# Altium footprint library SnapEDApcb.PcbLib: 1 footprints
Each footprint in its own frame and in the unit in brackets; x right, y up, seen from the top. Pads: shape width x height; smd on the part's side, far side on the other; paste and mask are expansions set on the pad; w line width, h text height; cw(c..) or ccw(c..) is an arc to the next point about the centre after c.
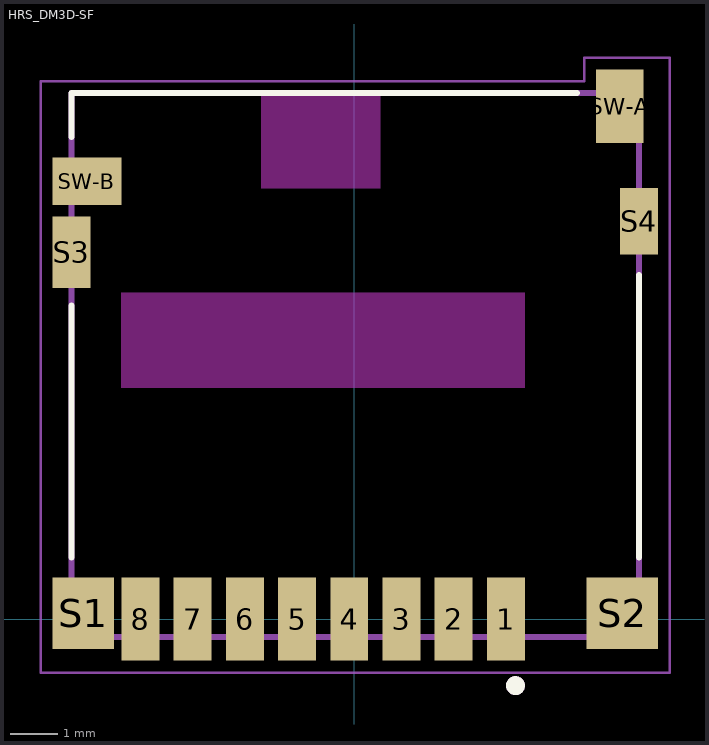
[diagram p0: the footprint, top view; thin cyan lines are the x and y axes]

## HRS_DM3D-SF [mm]
pads (14):
  rect 0.8x1.75 smd: 1(3.2,0) 2(2.1,0) 3(1,0) 4(-0.1,0) 5(-1.2,0) 6(-2.3,0) 7(-3.4,0) 8(-4.5,0)
  rect 1.3x1.5 smd: S1(-5.7,0.125)
  rect 1.5x1.5 smd: S2(5.65,0.125)
  rect 0.8x1.5 smd: S3(-5.95,7.725)
  rect 0.8x1.4 smd: S4(6,8.375)
  rect 1x1.55 smd: SW-A(5.6,10.8)
  rect 1.45x1 smd: SW-B(-5.625,9.225)
Top Overlay:
  circle w0.2: c3.4,-1.4 r0.1
  lines w0.127: -5.95,1.3 -5.95,6.6 ; -5.95,10.15 -5.95,11.075 4.7,11.075 ; 6,1.3 6,7.25
Keep-Out Layer:
  region: 0.55,9.075 -1.95,9.075 -1.95,11.075 0.55,11.075
  region: 3.6,4.875 -4.9,4.875 -4.9,6.875 3.6,6.875
  region: 3.6,4.875 -4.9,4.875 -4.9,6.875 3.6,6.875
  region: 0.55,9.075 -1.95,9.075 -1.95,11.075 0.55,11.075
Mechanical 13:
  circle w0.2: c3.4,-1.4 r0.1
  lines w0.127: -5.95,-0.375 -5.95,11.075 6,11.075 6,-0.375 -5.95,-0.375
Mechanical 15:
  lines w0.05: -6.6,-1.125 6.65,-1.125 6.65,11.825 4.85,11.825 4.85,11.325 -6.6,11.325 -6.6,-1.125